# EAGLE library part IC_MEM_W25X40CL (library dp_devices.v6)
4M-Bit serial flash memory with 4KB sectors and Dual I/O SPI
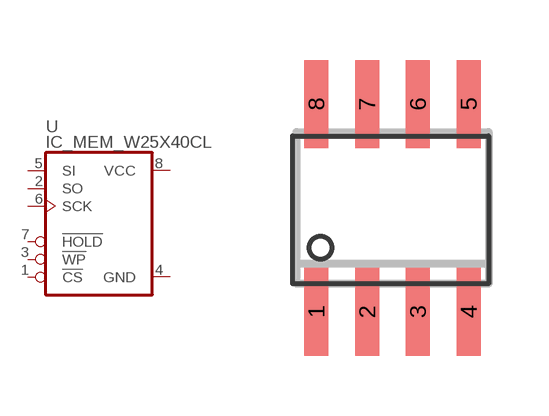
[diagram p203: symbol with the pads of SOIC-8; footprint SOIC-8]

Designator prefix U

## IC_MEM_W25X40CL  [SOIC-8]
1  !CS  in
2  SO  out
3  !WP  in
4  GND  pwr
5  SI  in
6  SCK  in
7  !HOLD  in
8  VCC  pwr

## Footprint SOIC-8 (pad centres in mm)
smd 0.6 x 2.2: 1 -1.905,-2.6; 2 -0.635,-2.6; 3 0.635,-2.6; 4 1.905,-2.6; 5 1.905,2.6; 6 0.635,2.6; 7 -0.635,2.6; 8 -1.905,2.6